# Altium footprint library huan_basic.PcbLib: 138 footprints (part 9 of 9)
Each footprint in its own frame and in the unit in brackets; x right, y up, seen from the top. Pads: shape width x height; smd on the part's side, far side on the other; paste and mask are expansions set on the pad; w line width, h text height; cw(c..) or ccw(c..) is an arc to the next point about the centre after c.
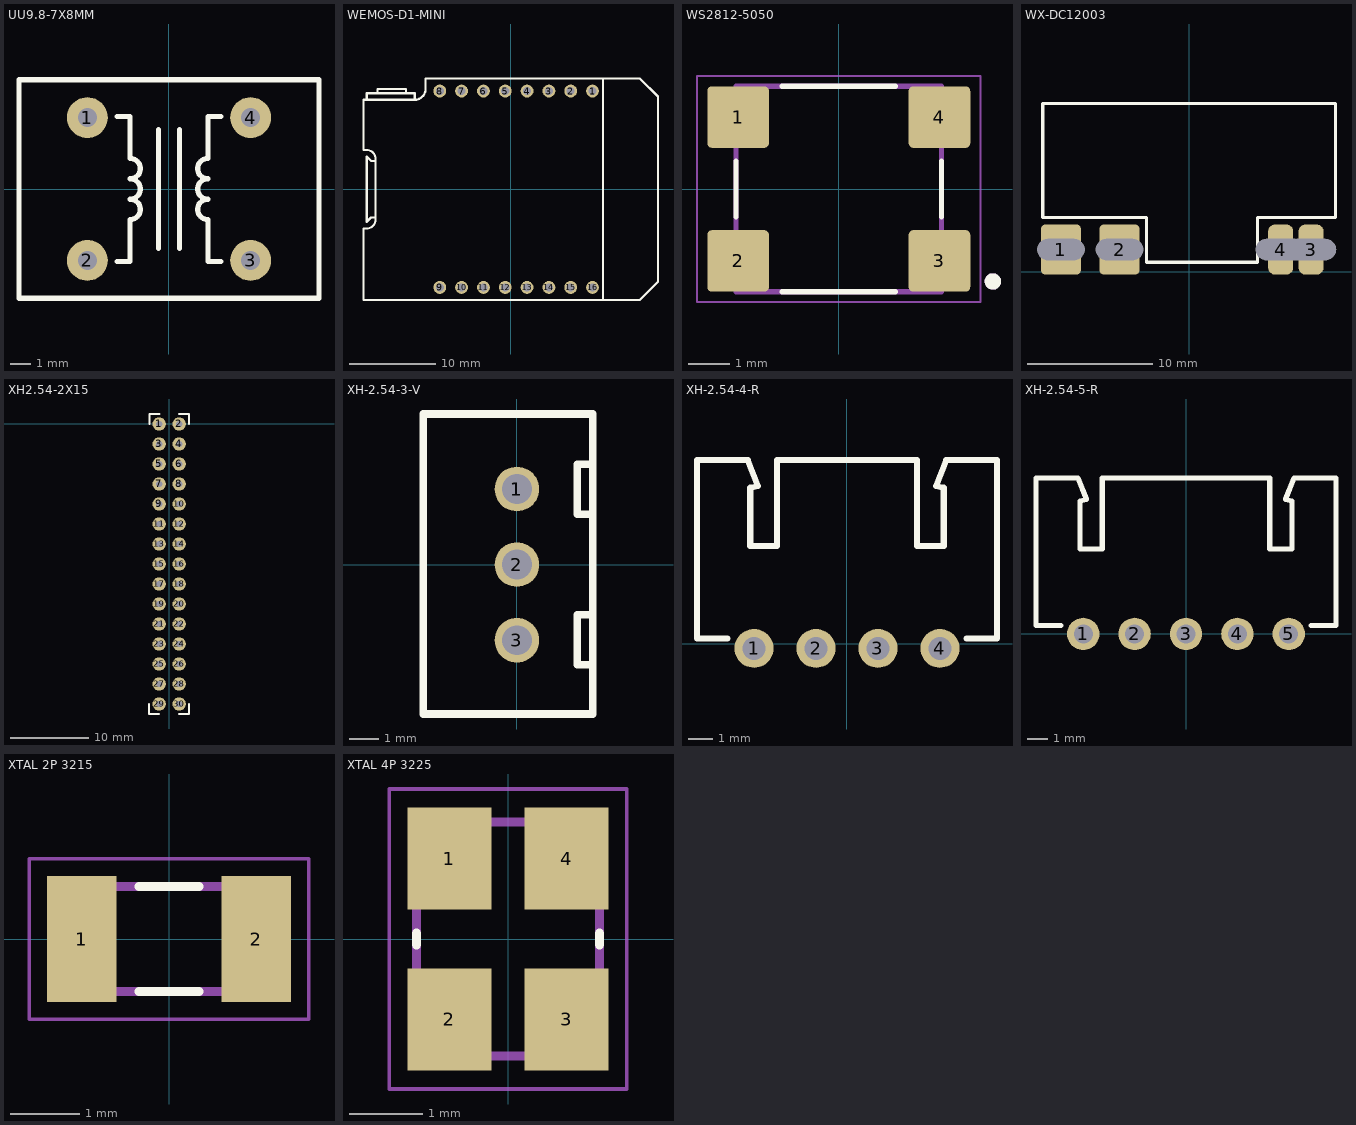
[diagram p8: the footprints below, top view; thin cyan lines are the x and y axes]

## UU9.8-7X8MM [mm]
pads (4):
  round 2 hole 0.94: 1(-4,3.5) 2(-4,-3.5) 3(4,-3.5) 4(4,3.5)
Top Overlay:
  lines w0.254: -2.54,-3.556 -1.908,-3.556 ; -2.54,3.556 -1.908,3.556 ; -1.908,-1.5 -1.908,-3.556 ; -1.908,1.5 -1.908,3.556 ; -1.905,-3.556 -1.908,-3.556 ; -1.905,-1.5 ccw(c-1.905,-1) -1.905,-0.5 ccw(c-1.905,0) -1.905,0.5 ccw(c-1.905,1) -1.905,1.5 ; -1.905,3.556 -1.908,3.556 ; -0.508,-2.921 -0.508,2.921 ; 0.508,-2.921 0.508,2.921 ; 1.905,-3.556 1.908,-3.556 ; 1.905,-1.5 cw(c1.905,-1) 1.905,-0.5 cw(c1.905,0) 1.905,0.5 cw(c1.905,1) 1.905,1.5 1.908,1.5 1.908,3.556 ; 1.905,3.556 1.908,3.556 ; 1.908,-1.5 1.908,-3.556 ; 2.54,-3.556 1.908,-3.556 ; 2.54,3.556 1.908,3.556 ; -7.35,-5.35 7.35,-5.35 7.35,5.35 -7.35,5.35 -7.35,-5.35
3D body "filtr-ac-pins7x8.STEP": height 14, standoff -3.3, extent -7.35,-5.35 7.35,5.35

## WEMOS-D1-MINI [mm]
pads (16):
  round 1.5 hole 0.94: 1(9.525,11.43) 2(6.985,11.43) 3(4.445,11.43) 4(1.905,11.43) 5(-0.635,11.43) 6(-3.175,11.43) 7(-5.715,11.43) 8(-8.255,11.43) 9(-8.255,-11.43) 10(-5.715,-11.43) 11(-3.175,-11.43) 12(-0.635,-11.43) 13(1.905,-11.43) 14(4.445,-11.43) 15(6.985,-11.43) 16(9.525,-11.43)
Top Overlay:
  lines w0.254: -16.764,10.414 -16.764,11.176 -11.176,11.176 -11.176,10.414 ; -15.494,11.176 -15.494,11.684 -14.087,11.684 -12.192,11.684 -12.192,11.176 ; 10.764,-12.9 10.764,12.9 ; -15.748,-3.302 -16.256,-3.302 -16.764,-3.81 -16.764,3.81 -16.256,3.302 -15.748,3.302 ; -15.748,-3.302 -15.748,-3.556 cw(c-16.764,-3.556) -16.764,-4.572 -17.15,-4.572 -17.15,-12.9 15.04,-12.9 17.15,-10.79 17.15,0 17.15,10.79 15.04,12.9 -9.906,12.9 -9.906,11.684 cw(c-11.176,11.684) -11.176,10.414 ; -15.748,-3.302 -15.748,0 -15.748,3.302 ; -15.748,3.302 -15.748,3.556 ; -15.748,3.302 -15.748,3.556 ; -15.748,3.556 ccw(c-16.764,3.556) -16.764,4.572 -17.15,4.572 -17.15,10.414 -11.176,10.414
3D body "wemos-mini-d1.stp": height 8.94, standoff -6, extent -17.15,-12.9 17.15,12.9

## WS2812-5050 [mm]
height 1.6
pads (4):
  rrect15% 1.5x1.5 smd: 1(-2.45,1.75) 2(-2.45,-1.75) 3(2.45,-1.75) 4(2.45,1.75)
Top Overlay:
  circle w0.2: c3.75,-2.25 r0.1
  lines w0.127: -2.5,-0.68 -2.5,0.68 ; -1.38,-2.5 1.38,-2.5 ; -1.38,2.5 1.38,2.5 ; 2.5,-0.68 2.5,0.68
Mechanical 13:
  circle w0.2: c3.75,-2.25 r0.1
  lines w0.127: -2.5,-2.5 -2.5,2.5 2.5,2.5 2.5,-2.5 -2.5,-2.5
Mechanical 15:
  lines w0.05: -3.45,-2.75 -3.45,2.75 3.45,2.75 3.45,-2.75 -3.45,-2.75
3D body "WS2812_RGB_LED_updated.stp": height 1.75, standoff 0.05, extent -2.675,-2.475 2.675,2.475

## WX-DC12003 [mm]
pads (4):
  rrect20% 3.2x4 hole 3.8 slot 1.7 at 90 deg: 1(-10.287,1.778) 2(-5.588,1.778)
  rrect50% 2x4 hole 4 slot 1.7 at 90 deg unplated: 3(9.779,1.778) 4(7.341,1.778)
Top Overlay:
  lines w0.254: -11.75,4.343 -11.75,13.49 11.75,13.49 11.75,4.343 5.486,4.343 5.486,0.762 -3.429,0.762 -3.429,4.343 -11.75,4.343
3D body "User Library-WX DC.step": height 15.95, standoff -2.2, extent -11.75,0 11.75,13.49

## XH2.54-2X15 [mm]
pads (30):
  round 1.7 hole 0.8: 1(-1.27,0) 2(1.27,0) 3(-1.27,-2.54) 4(1.27,-2.54) 5(-1.27,-5.08) 6(1.27,-5.08) 7(-1.27,-7.62) 8(1.27,-7.62) 9(-1.27,-10.16) 10(1.27,-10.16) 11(-1.27,-12.7) 12(1.27,-12.7) 13(-1.27,-15.24) 14(1.27,-15.24) 15(-1.27,-17.78) 16(1.27,-17.78) 17(-1.27,-20.32) 18(1.27,-20.32) 19(-1.27,-22.86) 20(1.27,-22.86) 21(-1.27,-25.4) 22(1.27,-25.4) 23(-1.27,-27.94) 24(1.27,-27.94) 25(-1.27,-30.48) 26(1.27,-30.48) 27(-1.27,-33.02) 28(1.27,-33.02) 29(-1.27,-35.56) 30(1.27,-35.56)
Top Overlay:
  lines w0.254: -2.54,-35.555 -2.54,-36.83 -1.265,-36.83 ; -2.5,-0.005 -2.5,1.27 -1.225,1.27 ; 1.225,-36.835 2.5,-36.835 2.5,-35.56 ; 1.225,1.27 2.5,1.27 2.5,-0.005
3D body "2x15 Male Pin Header.STEP": height 10.54, standoff -3, extent -2.5,-36.835 2.5,1.27

## XH-2.54-3-V [mm]
pads (4):
  round 1.5 hole 1: 1(0,2.54) 1(0,2.54) 2(0,0) 3(0,-2.54)
Top Overlay:
  lines w0.254: 2.55,-3.371 2.032,-3.371 2.032,-1.685 2.55,-1.685 ; 2.55,1.685 2.032,1.685 2.032,3.371 2.55,3.371 ; -3.15,-5.02 -3.15,5.06 2.55,5.06 2.55,-5.02 -3.15,-5.02
3D body "JST 2.54X3P.step": height 7, standoff -3, extent -3.15,-5.02 2.55,5.06

## XH-2.54-4-R [mm]
pads (4):
  round 1.6 hole 0.94: 1(-3.81,-0.178) 2(-1.27,-0.178) 3(1.27,-0.178) 4(3.81,-0.178)
Top Overlay:
  lines w0.254: -4.902,0.229 -6.147,0.229 -6.147,7.534 -4.064,7.534 -3.658,6.477 -3.962,6.401 -3.962,4.013 -2.87,4.013 -2.87,7.534 2.87,7.534 2.87,4.013 3.963,4.013 3.963,6.401 3.658,6.477 4.064,7.534 6.147,7.534 6.147,0.229 4.902,0.229
3D body "JST - XH - Thru (R) - 4Pin - 2.54mm.stp": height 5.84, standoff -3.38, extent -6.147,-0.503 6.147,7.534

## XH-2.54-5-R [mm]
pads (5):
  round 1.6 hole 0.94: 1(-5.08,0) 2(-2.54,0) 3(0,0) 4(2.54,0) 5(5.08,0)
Top Overlay:
  lines w0.254: -6.172,0.406 -7.417,0.406 -7.417,7.712 -5.334,7.712 -4.928,6.655 -5.232,6.579 -5.232,4.191 -4.14,4.191 -4.14,7.712 4.14,7.712 4.14,4.191 5.232,4.191 5.232,6.579 4.928,6.655 5.334,7.712 7.417,7.712 7.417,0.406 6.172,0.406
3D body "JST - XH - Thru R - 5Pin - 2.54mm.stp": height 5.84, standoff -3.38, extent -7.417,-0.376 7.417,7.661

## XTAL 2P 3215 [mm]
pads (2):
  rect 1x1.8 smd: 1(-1.25,0) 2(1.25,0)
Top Overlay:
  lines w0.127: -0.43,-0.75 0.43,-0.75 ; -0.43,0.75 0.43,0.75
Mechanical 13:
  lines w0.127: -1.6,-0.75 1.6,-0.75 1.6,0.75 -1.6,0.75 -1.6,-0.75
Mechanical 15:
  lines w0.05: -2,-1.15 2,-1.15 2,1.15 -2,1.15 -2,-1.15
3D body "step_temp.STEP": height 0.35, standoff 0, extent -1.6,-0.75 1.6,0.75

## XTAL 4P 3225 [mm]
height 0.6
pads (4):
  rect 1.15x1.4 smd: 1(-0.8,1.1) 2(-0.8,-1.1) 3(0.8,-1.1) 4(0.8,1.1)
Top Overlay:
  lines w0.127: -1.25,-0.08 -1.25,0.08 ; 1.25,-0.08 1.25,0.08
Mechanical 13:
  lines w0.127: -1.25,-1.6 -1.25,1.6 1.25,1.6 1.25,-1.6 -1.25,-1.6
Mechanical 15:
  lines w0.05: -1.625,-2.05 -1.625,2.05 1.625,2.05 1.625,-2.05 -1.625,-2.05
3D body "step_temp.STEP": height 0.6, standoff 0, extent -1.25,-1.6 1.25,1.6